# Altium schematic symbol library 397730003.SchLib: 1 symbol
Pins are listed as number, name and electrical type; pins without a type are passive.

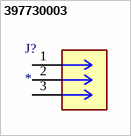
[diagram p0: symbol 397730003]

## 397730003
designator J?
3 Position Wire to Board Terminal Block Horizontal with Board 0.100 (2.54mm) Through Hole; MF: Molex; MP: 0397730003; SnapEDA_Link: https://www.snapeda.com/parts/0397730003/Molex/view-part/?ref=snap; Package: None; Value: *; Check_prices: https://www.snapeda.com/parts/0397730003/Molex/view-part/?ref=eda
footprint CONN_39773-0003_MOL
pins: 1, 2, 3